# Altium footprint library bs_libs.PcbLib: 125 footprints (part 1 of 8)
Each footprint in its own frame and in the unit in brackets; x right, y up, seen from the top. Pads: shape width x height; smd on the part's side, far side on the other; paste and mask are expansions set on the pad; w line width, h text height; cw(c..) or ccw(c..) is an arc to the next point about the centre after c.
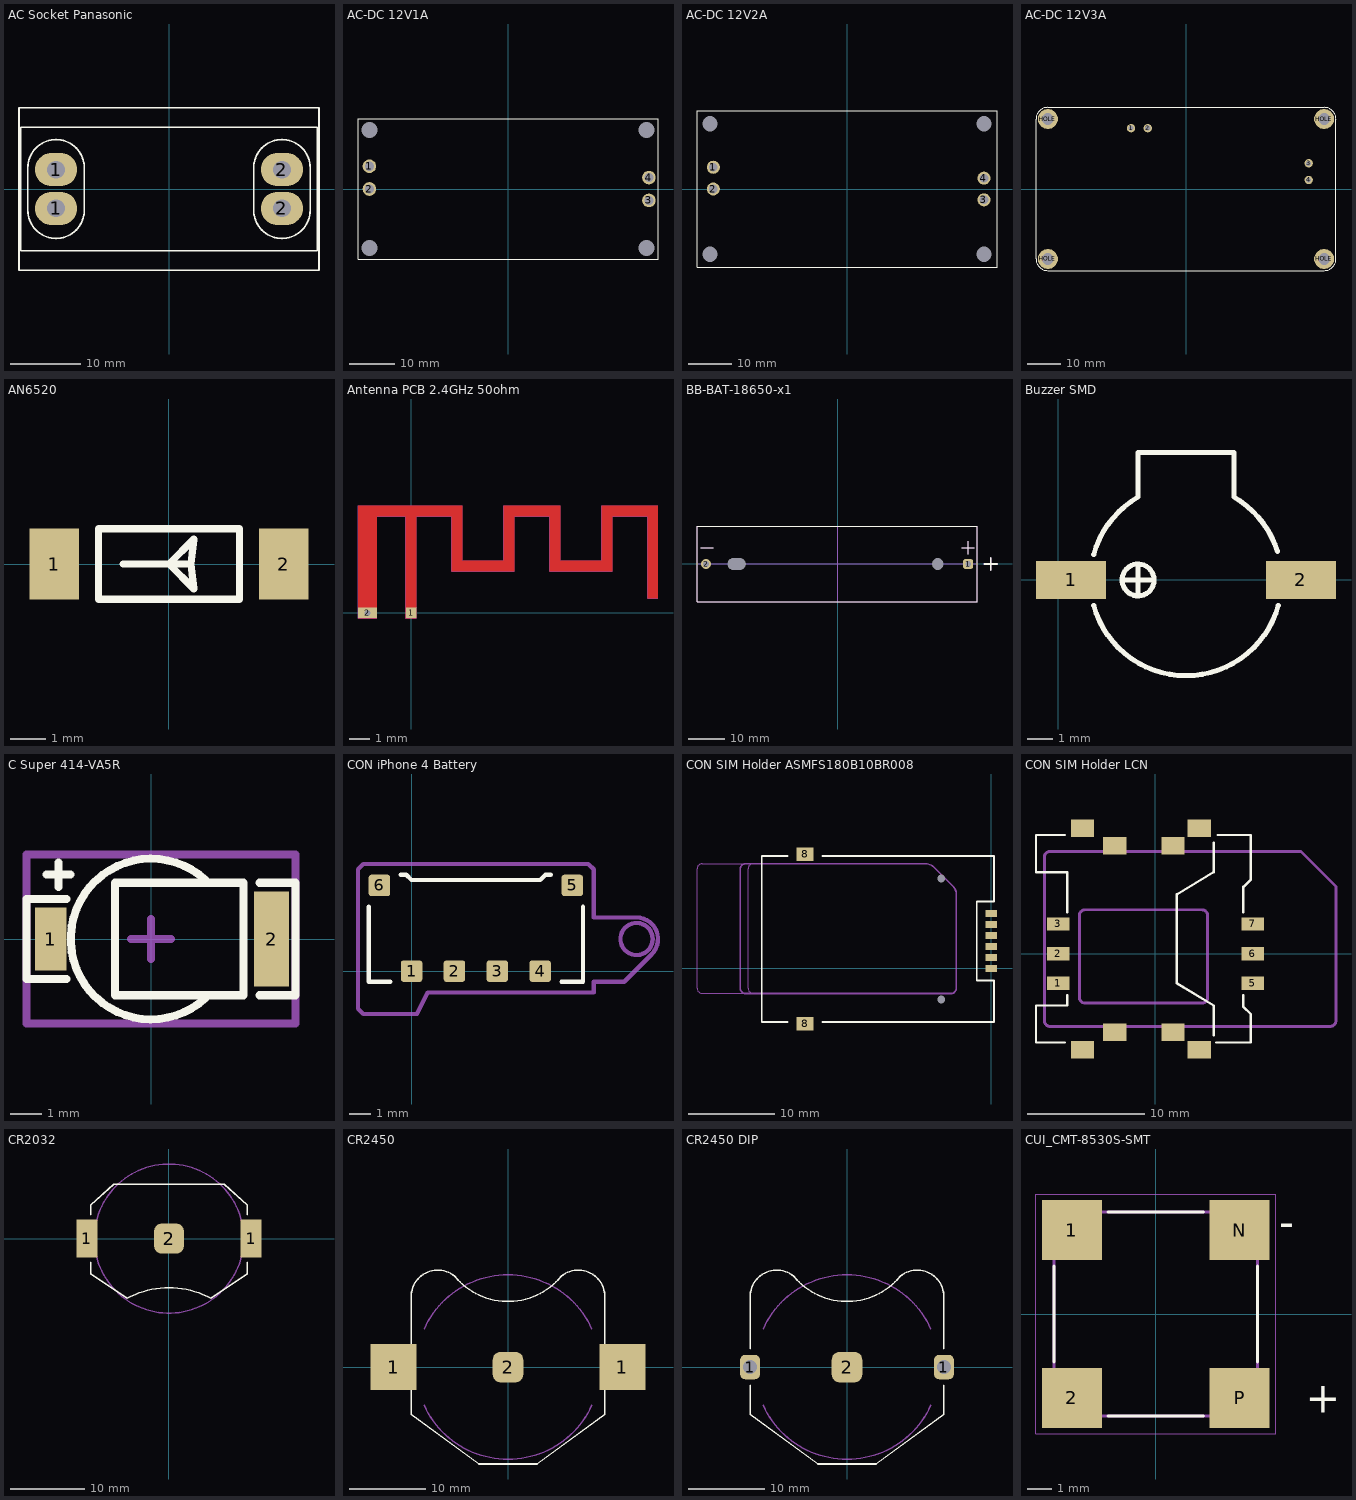
[diagram p0: the footprints below, top view; thin cyan lines are the x and y axes]

## AC Socket Panasonic [mm] "O cam dien panasonic"
pads (4):
  oval 6x4.7 hole 2.5: 1(-16,-2.75) 1(-16,2.75) 2(16,-2.75) 2(16,2.75)
Top Overlay:
  lines w0.254: -21.25,-11.5 -21.25,11.5 21.25,11.5 21.25,-11.5 -21.25,-11.5 ; -21,-8.75 21,-8.75 21,8.75 -21,8.75 -21,-8.75 ; -20,-3 ccw(c-16,-3) -12,-3 -12,3 ccw(c-16,3) -20,3 -20,-3 ; 12,-3 ccw(c16,-3) 20,-3 20,3 ccw(c16,3) 12,3 12,-3

## AC-DC 12V1A [mm]
pads (8):
  round 3 hole 2: 1(-30.5,5) 2(-30.5,0) 3(31,-2.5) 4(31,2.5)
  round 0 hole 3.5 unplated: HOLE(-30.5,-13) HOLE(-30.5,13) HOLE(30.5,-13) HOLE(30.5,13)
Top Overlay:
  lines w0.254: -33,-15.5 -33,15.5 33,15.5 33,-15.5 -33,-15.5
3D body: height 4, standoff 0, extent -33,-15.5 -28,-10.5
3D body: height 4, standoff 0, extent -33,10.5 -28,15.5
3D body: height 27, standoff 2, extent -33,-15.5 33,15.5
3D body: height 4, standoff 0, extent 28,10.5 33,15.5
3D body: height 4, standoff 0, extent 28,-15.5 33,-10.5

## AC-DC 12V2A [mm]
pads (8):
  round 3 hole 2: 1(-30.75,5) 2(-30.75,0) 3(31.5,-2.5) 4(31.5,2.5)
  round 0 hole 3.5 unplated: HOLE(-31.5,-15) HOLE(-31.5,15) HOLE(31.5,-15) HOLE(31.5,15)
Top Overlay:
  lines w0.254: -34.5,-18 -34.5,18 34.5,18 34.5,-18 -34.5,-18
Mechanical 1:
  text "IN_ACN" at -28,-0.5 h1.6
  text "IN_ACL" at -28,4.5 h1.6
  text "OUT_DC -" at 22,2 h1.6
  text "OUT_DC +" at 22,-3 h1.6
3D body: height 20, standoff 2, extent -34.5,-18 34.5,18
3D body: height 2, standoff 0, extent -34,-17.5 -29,-12.5
3D body: height 2, standoff 0, extent 29,-17.5 34,-12.5
3D body: height 2, standoff 0, extent 29,12.5 34,17.5
3D body: height 2, standoff 0, extent -34,12.5 -29,17.5

## AC-DC 12V3A [mm]
pads (8):
  round 2.5 hole 1.5: 1(-16.45,18.2) 2(-11.45,18.2) 3(36.725,7.7) 4(36.725,2.7)
  round 6 hole 3.5: HOLE(-41.35,-20.95) HOLE(-41.35,20.95) HOLE(41.35,-20.95) HOLE(41.35,20.95)
Top Overlay:
  lines w0.254: -44.9,-20.9 ccw(c-41.4,-20.9) -41.4,-24.4 41.4,-24.4 ccw(c41.4,-20.9) 44.9,-20.9 44.9,20.9 ccw(c41.4,20.9) 41.4,24.4 -41.4,24.4 ccw(c-41.4,20.9) -44.9,20.9 -44.9,-20.9
3D body: height 4, standoff 0, extent 38.85,-23.45 43.85,-18.45
3D body: height 4, standoff 0, extent -43.85,-23.45 -38.85,-18.45
3D body: height 4, standoff 0, extent -43.85,18.45 -38.85,23.45
3D body: height 4, standoff 0, extent 38.85,18.45 43.85,23.45
3D body: height 30, standoff 4, extent -44.9,-24.4 44.9,24.4

## AN6520 [mm] "2.4GHz SMD Multilayer Chip Antenna 6.5x2.2x1.0 mm"
pads (2):
  rect 1.4x2 smd: 1(-3.25,0) 2(3.25,0)
Top Overlay:
  lines w0.203: -1.3,0 0,0 ; 0,0 0.7,0.7 0.625,0 ; 0,0 0.7,-0.7 0.625,0 ; 0,0 0.625,0 ; -2,-1 -2,1 2,1 2,-1 -2,-1
3D body: height 1.05, standoff 0.05, extent -3.25,-1.1 3.25,1.1
3D body: height 1.1, standoff 0, extent -3.275,-1.125 -2.975,1.125
3D body: height 1.1, standoff 0, extent 2.975,-1.125 3.275,1.125

## Antenna PCB 2.4GHz 50ohm [mm]
pads (2):
  rect 0.5x0.5 smd: 1(0,0)
  rect 0.9x0.5 hole 0.28: 2(-2.1,0)
Top Layer:
  region: -2.55,5.15 2.45,5.15 2.45,2.51 4.45,2.51 4.45,5.15 7.15,5.15 7.15,2.51 9.15,2.51 9.15,5.15 11.85,5.15 11.85,0.71 11.35,0.71 11.35,4.65 9.65,4.65 9.65,2.01 6.65,2.01 6.65,4.65 4.95,4.65 4.95,2.01 1.95,2.01 1.95,4.65 0.25,4.65 0.25,-0.25 -0.25,-0.25 -0.25,4.65 -1.65,4.65 -1.65,-0.25 -2.55,-0.25
Mechanical 1:
  lines w0.01: -2.55,0.25 -1.65,0.25 ; -0.25,0.25 0.25,0.25 ; -2.55,-0.25 -2.55,5.15 2.45,5.15 2.45,2.51 4.45,2.51 4.45,5.15 7.15,5.15 7.15,2.51 9.15,2.51 9.15,5.15 11.85,5.15 11.85,0.71 11.35,0.71 11.35,4.65 9.65,4.65 9.65,2.01 6.65,2.01 6.65,4.65 4.95,4.65 4.95,2.01 1.95,2.01 1.95,4.65 0.25,4.65 0.25,-0.25 -0.25,-0.25 -0.25,4.65 -1.65,4.65 -1.65,-0.25 -2.55,-0.25

## BB-BAT-18650-x1 [mm]
pads (4):
  rrect50% 2.8x2.8 hole 1.6: 1(36.25,0)
  round 2.8 hole 1.6: 2(-36.5,0)
  round 0 hole 3.2 slot 5 at 0 deg unplated: HOLE(-28,0)
  round 0 hole 3.2 unplated: HOLE(27.75,0)
Top Overlay:
  lines w0.3: -38,4.5 -34.5,4.5 ; 34.5,4.5 38,4.5 ; 36.25,2.75 36.25,6.25 ; -39,-10.5 -39,10.5 38.75,10.5 38.75,-10.5 -39,-10.5
  lines w0.5: 40.75,0 44.25,0 ; 42.5,-1.75 42.5,1.75
Mechanical 1:
  lines w0.254: -39,0 38.75,0 ; -38,4.5 -36.25,4.5 -34.5,4.5 ; 0,-10.5 0,10.5 ; 34.5,4.5 36.25,4.5 ; 36.25,2.75 36.25,4.5 ; 36.25,6.25 36.25,4.5 ; 38,4.5 36.25,4.5 ; -39,-10.5 -39,10.5 38.75,10.5 38.75,-10.5 -39,-10.5
  lines w0.5: 40.75,0 42.5,0 ; 42.5,-1.75 42.5,0 ; 42.5,1.75 42.5,0 ; 44.25,0 42.5,0
3D body "User Library-18650 battery.step": height 24.37, standoff 6.17, extent -32.65,-9.1 32.5,9.1
3D body "User Library-18650 Full.STEP": height 21.65, standoff -3.83, extent -39.015,-10.4 38.635,10.4

## Buzzer SMD [mil]
pads (2):
  rect 110x60 smd: 1(20,0) 2(380,0)
Top Overlay:
  circle w8: c125,0 r25
  lines w8: 55.4,-39.89 ccw(c200,0) 344.6,-39.89 ; 55.4,39.89 cw(c200,0) 125.04,129.93 125.04,199.96 274.96,199.96 274.96,129.93 cw(c200,0) 343.26,44.46 ; 100,0 150,0 ; 125,-25 125,25

## C Super 414-VA5R [mm] "Taiyou Yuden's coin type PAS Capacitor"
pads (2):
  rect 1x2 smd: 1(-3.175,0)
  rect 1.1x3 smd: 2(3.81,0)
Top Overlay:
  lines w0.254: -3.302,2.032 -2.54,2.032 ; -2.921,1.651 -2.921,2.413 ; -2.667,-1.27 -3.937,-1.27 -3.937,1.27 -2.667,1.27 ; 1.728,-1.861 cw(c0,0) 1.728,1.861 ; 3.429,-1.778 4.572,-1.778 4.572,1.778 3.429,1.778 ; -1.143,-1.778 -1.143,1.778 2.921,1.778 2.921,-1.778 -1.143,-1.778
Mechanical 15:
  lines w0.254: -0.635,0 0.635,0 ; 0,-0.635 0,0.635 ; -3.937,-2.667 -3.937,2.667 4.572,2.667 4.572,-2.667 -3.937,-2.667
3D body: height 1.72, standoff 0.1, extent -2.4,-2.4 2.4,2.4

## CON iPhone 4 Battery [mm] "FPC Flex Battery Connector Plug For iPhone 4 4G"
pads (6):
  rrect25% 1x1 smd: 1(0,0) 2(2,0) 3(4,0) 4(6,0) 5(7.5,4) 6(-1.5,4)
Top Overlay:
  lines w0.203: -2,3 -2,-0.5 -1,-0.5 ; -0.5,4.5 -0.25,4.5 ; 6.5,4.5 6.25,4.5 ; 7,-0.5 8,-0.5 8,3 ; -0.25,4.5 0,4.25 6,4.25 6.25,4.5 ; -0.25,4.5 -0.25,4.5 ; 6.25,4.5 6.25,4.5
Mechanical 1:
  circle w0.203: c10.5,1.5 r0.75
  lines w0.203: 11.187,0.763 9.925,-0.5 9.9,-0.5 8.5,-0.5 8.5,-1 0.75,-1 0.25,-2 -2.25,-2 -2.5,-1.75 -2.5,4.75 -2.25,5 8.25,5 8.5,4.75 8.5,2.5 10.5,2.5 cw(c10.5,1.5) 11.207,0.793
3D body: height 1, standoff 0.2, extent 5.75,-0.525 6.25,1.475
3D body: height 1, standoff 0.2, extent 3.75,-0.525 4.25,1.475
3D body: height 1, standoff 0.2, extent 1.75,-0.525 2.25,1.475
3D body: height 1, standoff 0.2, extent -0.25,-0.525 0.25,1.475
3D body: height 0.2, standoff 0, extent -2,-0.5 8,4.5
3D body: height 1.2, standoff 0, extent -2,-0.5 8,4.5

## CON SIM Holder ASMFS180B10BR008 [mm] "SIM Holder,  6 pins"
pads (10):
  rect 1.35x0.8 smd: 1(0,0) 2(0,2.54) 3(0,5.08) 5(0,1.27) 6(0,3.81) 7(0,6.35)
  rect 2x1.6 smd: 8(-21.525,-6.4) 8(-21.525,13.2)
  round 0 hole 0.9 unplated: HOLE(-5.775,-3.6) HOLE(-5.775,10.4)
Top Overlay:
  lines w0.2: -23.525,-6.2 -26.525,-6.2 -26.525,13 -23.525,13 ; -19.525,-6.2 0.325,-6.2 0.325,-1.4 -1.675,-1.4 -1.675,7.75 0.325,7.75 0.325,13 -19.525,13
Mechanical 1:
  lines w0.1: -28.425,12.112 -28.437,12.1 -33.425,12.1 ccw(c-33.425,11.5) -34.025,11.5 -34.025,-2.3 ccw(c-33.425,-2.3) -33.425,-2.9 -28.425,-2.9 ; -27.525,-2.9 cw(c-27.525,-2.3) -28.125,-2.3 -28.125,11.5 cw(c-27.525,11.5) -27.525,12.1 ; -28.425,-2.9 -28.425,-2.9
  lines w0.2: -6.647,11.722 -4.4,9.475 cw(c-5.305,8.57) -4.025,8.57 -4.025,-2.3 cw(c-4.625,-2.3) -4.625,-2.9 -28.425,-2.9 cw(c-28.425,-2.3) -29.025,-2.3 -29.025,11.5 cw(c-28.425,11.5) -28.425,12.1 -7.55,12.1 ; -6.645,11.725 ccw(c-7.55,10.82) -7.55,12.1 ; -7.55,12.1 -7.55,12.1
3D body: height 1.85, standoff 0, extent -26.525,-6.2 0.325,13
3D body: height 1.65, standoff 0.85, extent -29.025,-2.9 -4.024,12.1

## CON SIM Holder LCN [mm] "Molex's SIM Holder,  6 pins"
pads (14):
  rect 1.905x1.143 smd: 1(-8.333,-2.54) 2(-8.333,0) 3(-8.333,2.54) 5(8.333,-2.54) 6(8.333,0) 7(8.333,2.54)
  rect 2x1.5 smd: ""(-6.25,-8.25) ""(-6.25,10.75) ""(-3.5,-6.75) ""(-3.5,9.25) ""(1.5,-6.75) ""(1.5,9.25) ""(3.75,-8.25) ""(3.75,10.75)
Top Overlay:
  lines w0.203: -7.747,-7.62 -10.238,-7.62 -10.238,-4.445 -7.571,-4.445 -7.571,-3.556 ; -7.747,10.16 -10.238,10.16 -10.238,6.985 -7.571,6.985 -7.571,3.556 ; 5.002,-6.985 5.002,-4.445 1.827,-2.54 1.827,5.08 5.002,6.985 5.002,9.525 ; 5.207,-7.62 8.177,-7.62 8.177,-5.207 7.542,-4.572 7.542,-3.556 ; 5.334,10.16 8.177,10.16 8.177,6.985 8.177,6.35 7.542,5.715 7.542,3.556
Mechanical 1:
  lines w0.254: -9.523,-5.743 ccw(c-9.023,-5.743) -9.023,-6.243 14.977,-6.243 ccw(c14.977,-5.743) 15.477,-5.743 15.477,5.757 12.477,8.757 -9.023,8.757 ccw(c-9.023,8.257) -9.523,8.257 -9.523,-5.743 ; -6.523,-3.743 ccw(c-6.023,-3.743) -6.023,-4.243 3.977,-4.243 ccw(c3.977,-3.743) 4.477,-3.743 4.477,3.257 ccw(c3.977,3.257) 3.977,3.757 -6.023,3.757 ccw(c-6.023,3.257) -6.523,3.257 -6.523,-3.743

## CR2032 [mm]
pads (3):
  rect 2.8x5.08 smd: 1(-11,0) 1(11,0)
  rrect50% 4x4 smd: 2(0,0)
Top Overlay:
  lines w0.203: -10.5,-3.2 -10.5,-4.7 -5.6,-8 cw(c0,-18.4) 5.6,-8 10.5,-4.7 10.5,-3.2 ; -10.5,3.2 -10.5,4.5 -7.4,7.3 7.4,7.3 10.5,4.5 10.5,3.2
Mechanical 31:
  circle w0.203: c0,0 r10
3D body "User Library-BK-912_V1I3.STEP": height 4.47, standoff 0, extent -11.43,-7.868 11.43,7.37
3D body "User Library-Battery, CR2032.step": height 3.17, standoff -0.01, extent -10.007,-10.007 10.008,10.008

## CR2450 [mm]
pads (3):
  rect 6.07x6.07 smd: 1(-15,0) 1(15,0)
  rrect50% 4x4 smd: 2(0,0)
Top Overlay:
  lines w0.203: -12.7,-2.4 -12.7,-6.2 -3.8,-12.7 3.8,-12.7 12.7,-6.2 12.7,-2.4 ; -12.7,2.4 -12.7,9.2 cw(c-9.2,9.2) -6.978,11.905 ; -6.975,11.908 ccw(c0,17.6) 6.975,11.908 ; 6.978,11.905 cw(c9.2,9.2) 12.7,9.2 12.7,2.4
Mechanical 31:
  lines w0.203: -11,-5 ccw(c0,0) 11,-5 ; -11,5 cw(c0,0) 11,5
3D body "User Library-CR 2450.step": height 5, standoff 0.25, extent -12.25,-12.25 12.25,12.25
3D body "User Library-Keystone 3008 Battery Holder.step": height 5.84, standoff 0, extent -17.78,-12.827 17.78,10.17

## CR2450 DIP [mm]
pads (3):
  rrect50% 2.6x3.2 hole 1.8: 1(-12.7,0) 1(12.7,0)
  rrect50% 4x4 smd: 2(0,0)
Top Overlay:
  lines w0.203: -12.7,-2.4 -12.7,-6.2 -3.8,-12.7 3.8,-12.7 12.7,-6.2 12.7,-2.4 ; -12.7,2.4 -12.7,9.2 cw(c-9.2,9.2) -6.978,11.905 ; -6.975,11.908 ccw(c0,17.6) 6.975,11.908 ; 6.978,11.905 cw(c9.2,9.2) 12.7,9.2 12.7,2.4
Mechanical 31:
  lines w0.203: -11,-5 ccw(c0,0) 11,-5 ; -11,5 cw(c0,0) 11,5
3D body "User Library-CR 2450.step": height 5, standoff 0.25, extent -12.25,-12.25 12.25,12.25
3D body "User Library-Keystone 3008 Battery Holder.step": height 5.84, standoff 0, extent -17.78,-12.827 17.78,10.17

## CUI_CMT-8530S-SMT [mm]
pads (4):
  rect 2.5x2.5 smd: 1(-3.5,3.5) 2(-3.5,-3.5) N(3.5,3.5) P(3.5,-3.5)
Top Overlay:
  lines w0.127: -4.25,-2 -4.25,2 ; -2,-4.25 2,-4.25 ; -2,4.25 2,4.25 ; 4.25,-2 4.25,2
  text "-" at 5.16,3.22 h1.27
  text "+" at 6.255,-4.133 h1.27
Mechanical 13:
  lines w0.127: -4.25,-4.25 4.25,-4.25 4.25,4.25 -4.25,4.25 -4.25,-4.25
Mechanical 15:
  lines w0.05: -5,-5 5,-5 5,5 -5,5 -5,-5
3D body "CMT-8530S-SMT-TR.step": height 3, standoff 0, extent -4.25,-4.25 4.25,4.25